# Altium footprint library R15100B.PcbLib: 1 footprints
Each footprint in its own frame and in the unit in brackets; x right, y up, seen from the top. Pads: shape width x height; smd on the part's side, far side on the other; paste and mask are expansions set on the pad; w line width, h text height; cw(c..) or ccw(c..) is an arc to the next point about the centre after c.
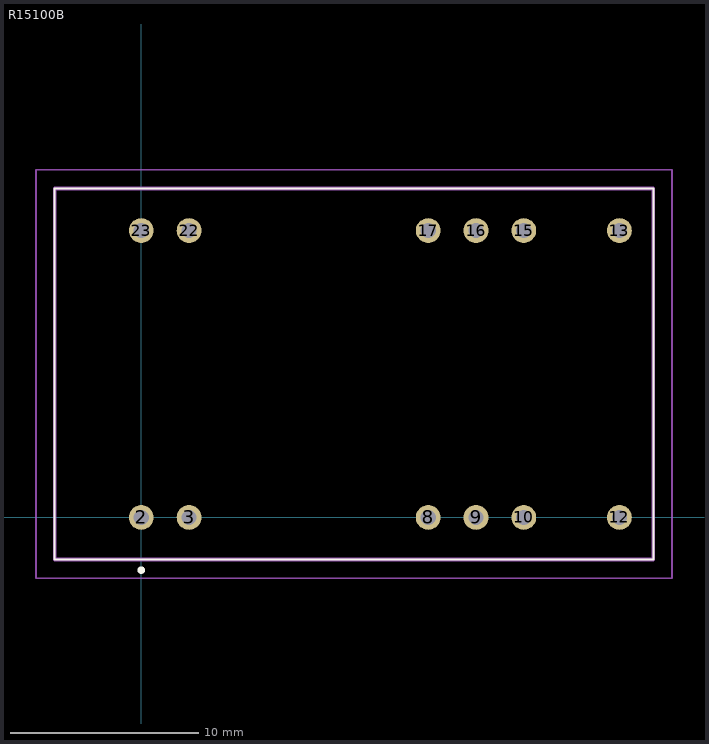
[diagram p0: the footprint, top view; thin cyan lines are the x and y axes]

## R15100B [mm]
pads (12):
  round 1.316 hole 0.81: 2(0,0) 3(2.54,0) 8(15.24,0) 9(17.78,0) 10(20.32,0) 12(25.4,0) 13(25.4,15.24) 15(20.32,15.24) 16(17.78,15.24) 17(15.24,15.24) 22(2.54,15.24) 23(0,15.24)
Top Overlay:
  lines w0.1: -4.6,-2.23 27.2,-2.23 27.2,17.47 -4.6,17.47 -4.6,-2.23
  lines w0.2: 0,-2.9 cw(c0,-2.8) 0,-2.7 ; 0,-2.9 0,-2.9 ; 0,-2.9 ccw(c0,-2.8) 0,-2.7 ; 0,-2.7 0,-2.7
Mechanical 15:
  lines w0.2: -4.6,-2.23 27.2,-2.23 27.2,17.47 -4.6,17.47 -4.6,-2.23
Mechanical 20:
  lines w0.1: -5.6,-3.23 28.2,-3.23 28.2,18.47 -5.6,18.47 -5.6,-3.23